# Altium schematic symbol library 0.1 Ω, 1 W, 1206.SchLib: 1 symbol
Pins are listed as number, name and electrical type; pins without a type are passive.

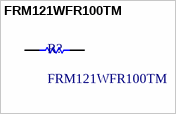
[diagram p0: symbol FRM121WFR100TM]

## FRM121WFR100TM
designator R?
0.1 Ω, 1 W, 1206; JLCPCB Part #: C7467250
footprint R_1206_3216Metric (Chip Resistor, 2-Leads, Body 3.20x1.60mm, IPC Medium Density, JLCPCB-compatible land pattern)
pins: 1, 2